# Altium integrated library SS34-A.IntLib: 1 symbol
Pins are listed as number, name and electrical type; pins without a type are passive.

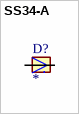
[diagram p0: symbol SS34-A]

## SS34-A
designator D?
IDC CABLE-ASS34A/ AE34G / ASS34A; MF: Microdiode Electronics; MP: SS34A; SnapEDA_Link: https://www.snapeda.com/parts/SS34A/Applied+Avionics/view-part/?ref=snap; Package: DO-214 Multicomp; Value: *; Check_prices: https://www.snapeda.com/parts/SS34A/Applied+Avionics/view-part/?ref=eda
footprint DO-214AC
pins: A, C